# Altium schematic symbol library 10151348-00011LF.SchLib: 1 symbol
Pins are listed as number, name and electrical type; pins without a type are passive.

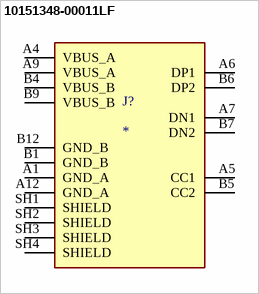
[diagram p0: symbol 10151348-00011LF]

## 10151348-00011LF
designator J?
USB Type C Receptacle T/H 14Pin Upright; MF: Amphenol ICC (FCI); MP: 10151348-00011LF; SnapEDA_Link: https://www.snapeda.com/parts/10151348-00011LF/Amphenol+ICC/view-part/?ref=snap; Package: None; Value: *; Check_prices: https://www.snapeda.com/parts/10151348-00011LF/Amphenol+ICC/view-part/?ref=eda
footprint AMPHENOL_10151348-00011LF
pins: A1 GND_A (power), A4 VBUS_A (power), A5 CC1, A6 DP1, A7 DN1, A9 VBUS_A (power), A12 GND_A (power), B1 GND_B (power), B4 VBUS_B (power), B5 CC2, B6 DP2, B7 DN2, B9 VBUS_B (power), B12 GND_B (power), SH1 SHIELD, SH2 SHIELD, SH3 SHIELD, SH4 SHIELD